# Altium schematic symbol library HT7833.SchLib: 1 symbol
Pins are listed as number, name and electrical type; pins without a type are passive.

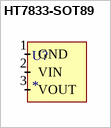
[diagram p0: symbol HT7833-SOT89]

## HT7833-SOT89
designator U?
footprint TI SOT-89 PK (SOT89, 3-Leads, Body 4.50x2.50mm, Pitch 1.50mm, Lead Span 3.3mm, IPC Medium Density)
pins: 1 GND, 2 VIN, 3 VOUT